# Altium footprint library pasive.PcbLib: 7 footprints
Each footprint in its own frame and in the unit in brackets; x right, y up, seen from the top. Pads: shape width x height; smd on the part's side, far side on the other; paste and mask are expansions set on the pad; w line width, h text height; cw(c..) or ccw(c..) is an arc to the next point about the centre after c.
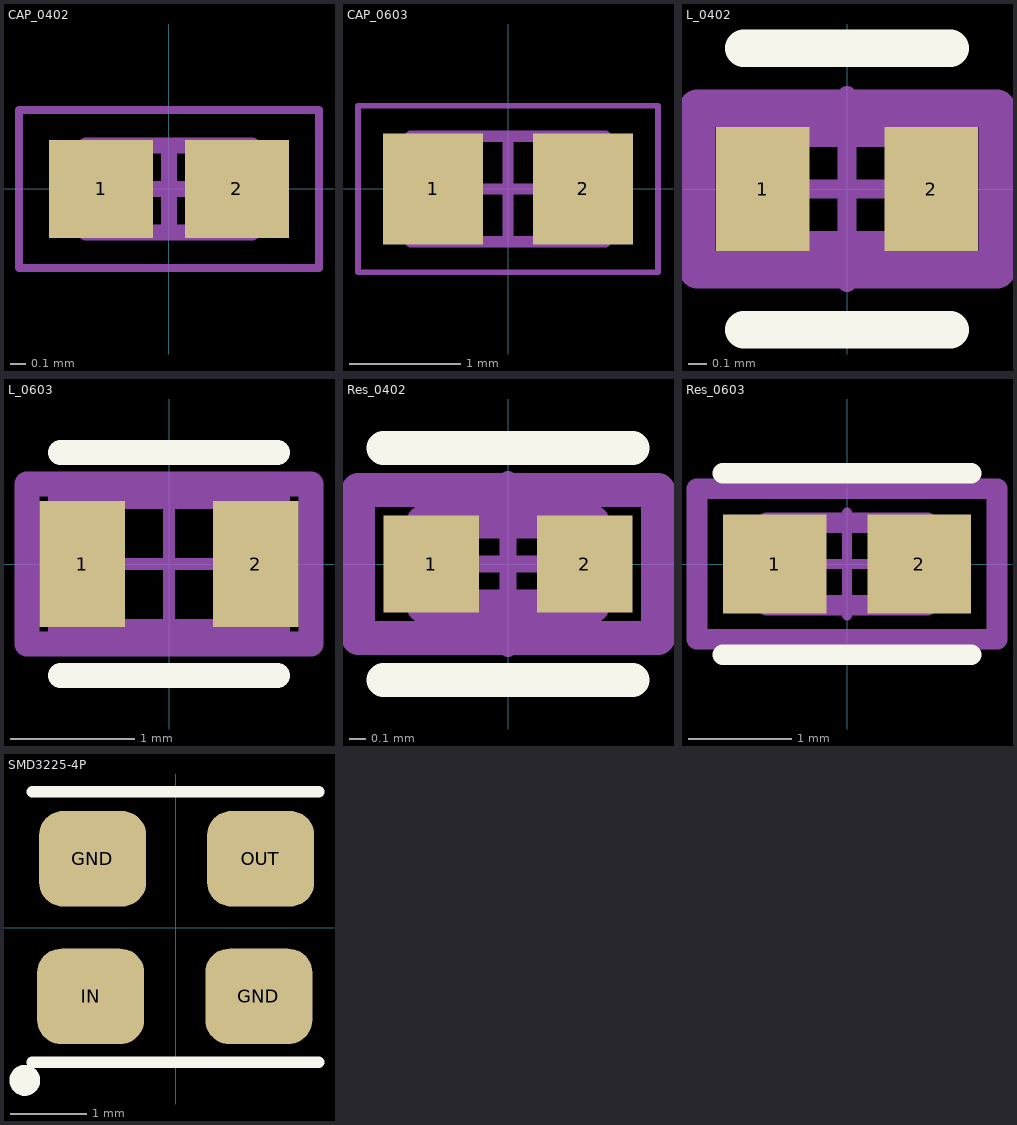
[diagram p0: the footprints below, top view; thin cyan lines are the x and y axes]

## CAP_0402 [mm] "Chip Capacitor, 2-Leads, Body 1.00x0.50mm, IPC Medium Density"
height 0.6
pads (2):
  rect 0.66x0.62 smd: 1(-0.43,0) 2(0.43,0)
Top 3D Body:
  lines w0.1: -0.525,-0.275 -0.525,0.275 0.525,0.275 0.525,-0.275 -0.525,-0.275
Top Courtyard:
  lines w0.05: -0.95,-0.5 -0.95,0.5 0.95,0.5 0.95,-0.5 -0.95,-0.5
  lines w0.1: -0.275,0 0.275,0 ; 0,-0.275 0,0.275
3D body: height 0.6, standoff 0, extent -0.225,-0.275 0.225,0.275
3D body: height 0.6, standoff 0, extent -0.525,-0.275 -0.225,0.275
3D body: height 0.6, standoff 0, extent 0.225,-0.275 0.525,0.275

## CAP_0603 [mm] "Chip Capacitor, 2-Leads, Body 1.60x0.80mm, IPC Medium Density"
height 0.87
pads (2):
  rect 0.9x1 smd: 1(-0.675,0) 2(0.675,0)
Top 3D Body:
  lines w0.1: -0.875,-0.475 0.875,-0.475 0.875,0.475 -0.875,0.475 -0.875,-0.475
Top Courtyard:
  lines w0.05: -1.35,-0.75 1.35,-0.75 1.35,0.75 -1.35,0.75 -1.35,-0.75
  lines w0.1: -0.475,0 0.475,0 ; 0,-0.475 0,0.475
3D body: height 0.87, standoff 0, extent 0.525,-0.475 0.875,0.475
3D body: height 0.87, standoff 0, extent -0.875,-0.475 -0.525,0.475
3D body: height 0.87, standoff 0, extent -0.525,-0.475 0.525,0.475

## L_0402 [mm]
pads (2):
  rect 0.5x0.66 smd paste+0 mask+0: 1(-0.45,0) 2(0.45,0)
Top Overlay:
  lines w0.2: -0.55,-0.75 0.55,-0.75 ; -0.55,0.75 0.55,0.75
Top Assembly:
  lines w0.2: -0.8,-0.43 -0.8,0.43 0.8,0.43 0.8,-0.43 -0.8,-0.43
  text ".Designator" at 0,0.188 h1
Top 3D Body:
  lines w0.2: -0.55,-0.325 -0.55,0.325 0.55,0.325 0.55,-0.325 -0.55,-0.325
Top Courtyard:
  lines w0.2: -0.8,-0.43 -0.8,0.43 0.8,0.43 0.8,-0.43 -0.8,-0.43
Top Component Center:
  lines w0.1: -0.5,0 0.5,0 ; 0,-0.5 0,0.5
3D body "Ind_Murata_LQW15CN1R0M10B_eec.STEP": height 0.25, standoff 0, extent -0.8,-0.43 0.8,0.43

## L_0603 [mm]
pads (2):
  rect 0.69x1.02 smd paste+0 mask+0: 1(-0.7,0) 2(0.7,0)
Top Overlay:
  lines w0.2: -0.875,-0.9 0.875,-0.9 ; -0.875,0.9 0.875,0.9
Top Assembly:
  lines w0.2: -1.145,-0.645 -1.145,0.645 1.145,0.645 1.145,-0.645 -1.145,-0.645
  text ".Designator" at 0,0.188 h1
Top 3D Body:
  lines w0.2: -0.875,-0.545 -0.875,0.545 0.875,0.545 0.875,-0.545 -0.875,-0.545
Top Courtyard:
  lines w0.2: -1.145,-0.645 -1.145,0.645 1.145,0.645 1.145,-0.645 -1.145,-0.645
Top Component Center:
  lines w0.1: -0.5,0 0.5,0 ; 0,-0.5 0,0.5
3D body "Ind_Coilcraft_0603HP-R10XJEU_eec.STEP": height 0.25, standoff 0, extent -1.145,-0.645 1.145,0.645

## Res_0402 [mm]
pads (2):
  rect 0.565x0.572 smd paste+0 mask+0: 1(-0.454,0) 2(0.454,0)
Top Overlay:
  lines w0.2: -0.736,-0.686 0.736,-0.686 ; -0.736,0.686 0.736,0.686
Top Assembly:
  lines w0.2: -0.886,-0.436 0.886,-0.436 0.886,0.436 -0.886,0.436 -0.886,-0.436
  text ".Designator" at 0,0.188 h1
Top 3D Body:
  lines w0.2: -0.5,-0.25 0.5,-0.25 0.5,0.25 -0.5,0.25 -0.5,-0.25
Top Courtyard:
  lines w0.2: -0.886,-0.436 0.886,-0.436 0.886,0.436 -0.886,0.436 -0.886,-0.436
Top Component Center:
  lines w0.1: -0.5,0 0.5,0 ; 0,-0.5 0,0.5
3D body "Res_Vishay_MCS04020D2213BE100_eec.STEP": height 0.25, standoff 0, extent -0.886,-0.436 0.886,0.436

## Res_0603 [mm]
pads (2):
  rect 1.006x0.958 smd paste+0 mask+0: 1(-0.701,0) 2(0.701,0)
Top Overlay:
  lines w0.2: -1.204,-0.879 1.204,-0.879 ; -1.204,0.879 1.204,0.879
Top Assembly:
  lines w0.2: -1.454,-0.729 1.454,-0.729 1.454,0.729 -1.454,0.729 -1.454,-0.729
  text ".Designator" at 0,0.188 h1
Top 3D Body:
  lines w0.2: -0.775,-0.4 0.775,-0.4 0.775,0.4 -0.775,0.4 -0.775,-0.4
Top Courtyard:
  lines w0.2: -1.454,-0.729 1.454,-0.729 1.454,0.729 -1.454,0.729 -1.454,-0.729
Top Component Center:
  lines w0.1: -0.5,0 0.5,0 ; 0,-0.5 0,0.5
3D body "Res_Stackpole_Electronics_RMCF0603JT1M80_eec.STEP": height 0.25, standoff 0, extent -1.454,-0.729 1.454,0.729

## SMD3225-4P [mm]
pads (4):
  rrect50% 1.4x1.25 smd: GND(-1.087,0.9) GND(1.088,-0.9) IN(-1.112,-0.9) OUT(1.113,0.9)
Top Overlay:
  circle w0.254: c-1.975,-2 r0.075
  lines w0.15: -1.88,-1.763 1.87,-1.763 ; -1.875,1.775 1.875,1.775
3D body "NX3225SA.step": height 0.55, standoff 0, extent -1.6,-1.25 1.6,1.25